# Altium schematic symbol library Sheet1.SchLib: 1 symbol
Pins are listed as number, name and electrical type; pins without a type are passive.

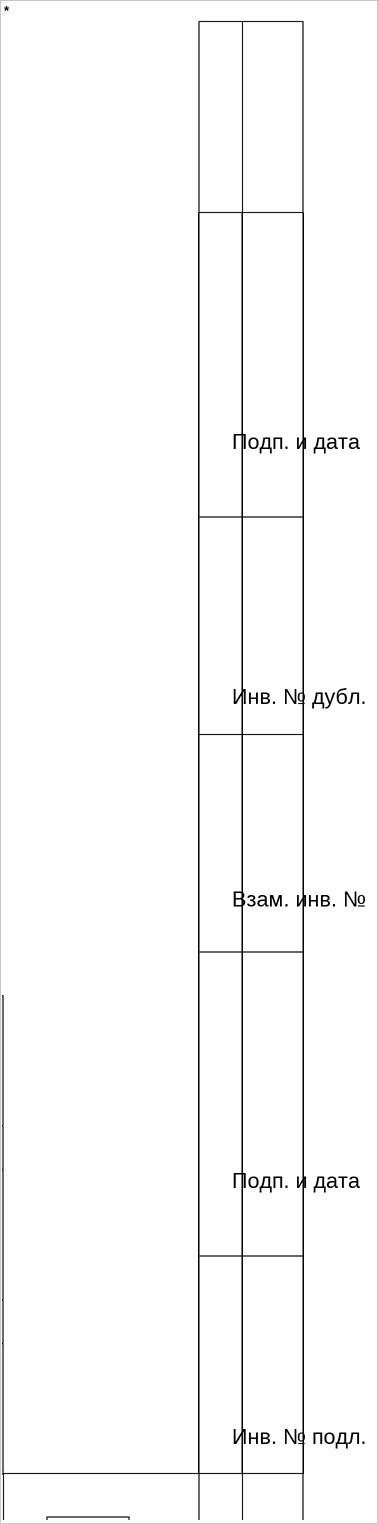
[diagram p0: symbol *]

## *
designator *
text: Подп. и дата; Инв. № дубл.; Взам. инв. №; Инв. № подл.